# Altium footprint library SOT-23_BEC.PcbLib: 1 footprints
Each footprint in its own frame and in the unit in brackets; x right, y up, seen from the top. Pads: shape width x height; smd on the part's side, far side on the other; paste and mask are expansions set on the pad; w line width, h text height; cw(c..) or ccw(c..) is an arc to the next point about the centre after c.
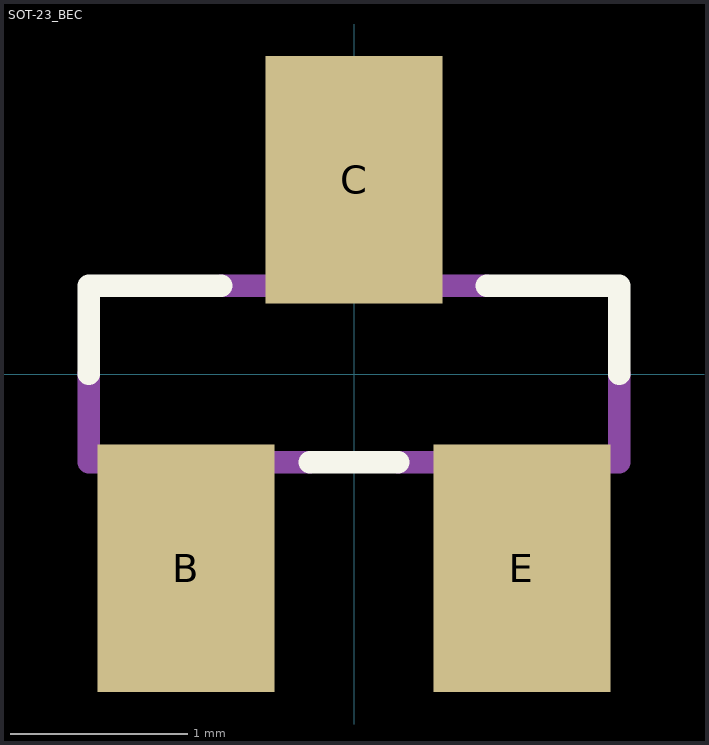
[diagram p0: the footprint, top view; thin cyan lines are the x and y axes]

## SOT-23_BEC [mm]
pads (3):
  rect 1x1.4 smd: B(-0.95,-1.1) C(0,1.1) E(0.95,-1.1)
Top Overlay:
  lines w0.127: -1.5,0 -1.5,0.5 -0.75,0.5 ; -0.25,-0.5 0.25,-0.5 ; 0.75,0.5 1.5,0.5 1.5,0
Assembly Top:
  region: 0.229,0.586 -0.229,0.586 -0.229,1.17 0.229,1.17
  region: 1.168,-1.17 0.711,-1.17 0.711,-0.586 1.168,-0.586
  region: -0.711,-1.17 -1.168,-1.17 -1.168,-0.586 -0.711,-0.586
  lines w0.127: -1.5,0 -1.5,-0.5 -0.25,-0.5 ; -0.75,0.5 0.75,0.5 ; 0.25,-0.5 1.5,-0.5 1.5,0
3D body "SS8050-G--3DModel-STEP-1.STEP": height 1.14, standoff 0, extent -1.448,-1.3 1.448,1.1